# EAGLE library part SQJQ466E-T1_GE3 (library SQJQ466E-T1_GE3)
VISHAY - SQJQ466E-T1_GE3 - MOSFET, AEC-Q101, N-CH, 60V, POWERPAK Source: Datasheet <https://www.vishay.com/docs/75138/sqjq466e.pdf>
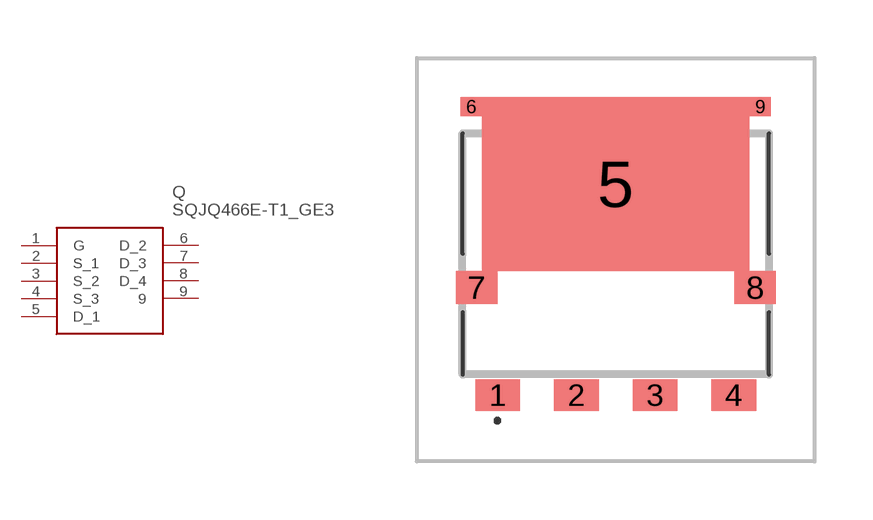
[diagram p0: symbol with the pads of SQJQ466ET1_GE3; footprint SQJQ466ET1_GE3]

Designator prefix Q

## SQJQ466E-T1_GE3 (Arrow_Part_Number: SQJQ466E-T1_GE3; Arrow_Price-Stock: https://www.arrow.com/en/products/sqjq466e-t1-ge3/vishay.html?utm_currency=USD&region=nac; Description: VISHAY - SQJQ466E-T1_GE3 - MOSFET, AEC-Q101, N-CH, 60V, POWERPAK; Height: 1.8mm; Manufacturer_Name: Vishay; Manufacturer_Part_Number: SQJQ466E-T1_GE3; Mouser_Part_Number: 78-SQJQ466E-T1_GE3; Mouser_Price-Stock: https://www.mouser.co.uk/ProductDetail/Vishay-Siliconix/SQJQ466E-T1_GE3?qs=5aG0NVq1C4wZZxWgJuXbbg%3D%3D)  [SQJQ466ET1_GE3]
1  G
2  S_1
3  S_2
4  S_3
5  D_1
6  D_2
7  D_3
8  D_4
9  9

## Footprint SQJQ466ET1_GE3 (pad centres in mm)
PowerPAK® 8 x 8L Single_24
smd 1.15 x 0.82: 1 -3.045,-3.49; 2 -1.015,-3.49; 3 1.015,-3.49; 4 3.045,-3.49
smd 6.9 x 4.49: 5 0,1.955
smd 0.55 x 0.5: 6 -3.725,3.95; 9 3.725,3.95
smd 1.07 x 0.85: 7 -3.59,-0.715; 8 3.59,-0.715